# Altium footprint library uln2803_footprint.PcbLib: 2 footprints
Each footprint in its own frame and in the unit in brackets; x right, y up, seen from the top. Pads: shape width x height; smd on the part's side, far side on the other; paste and mask are expansions set on the pad; w line width, h text height; cw(c..) or ccw(c..) is an arc to the next point about the centre after c.
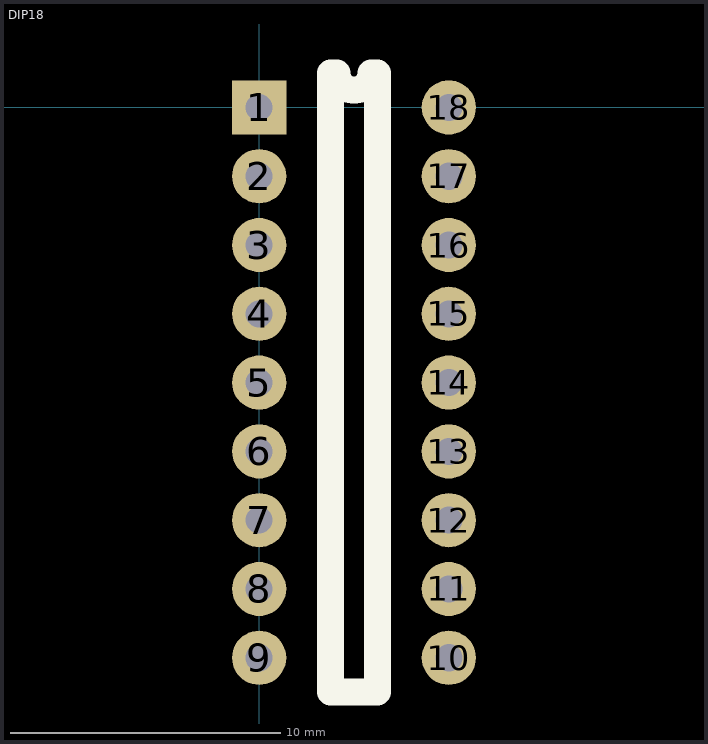
[diagram p0: the footprints below, top view; thin cyan lines are the x and y axes]

## DIP18 [mm]
pads (18):
  rect 2x2 hole 1: 1(0,0)
  round 2 hole 1: 2(0,-2.54) 3(0,-5.08) 4(0,-7.62) 5(0,-10.16) 6(0,-12.7) 7(0,-15.24) 8(0,-17.78) 9(0,-20.32) 10(7,-20.32) 11(7,-17.78) 12(7,-15.24) 13(7,-12.7) 14(7,-10.16) 15(7,-7.62) 16(7,-5.08) 17(7,-2.54) 18(7,0)
Top Overlay:
  lines w1: 2.635,-21.59 2.635,1.27 2.865,1.27 ccw(c3.5,1.27) 4.135,1.27 4.365,1.27 4.365,-21.59 2.635,-21.59

## PCBComponent_1 [mm]